# Altium footprint library Silabs.PcbLib: 18 footprints (part 1 of 2)
Each footprint in its own frame and in the unit in brackets; x right, y up, seen from the top. Pads: shape width x height; smd on the part's side, far side on the other; paste and mask are expansions set on the pad; w line width, h text height; cw(c..) or ccw(c..) is an arc to the next point about the centre after c.
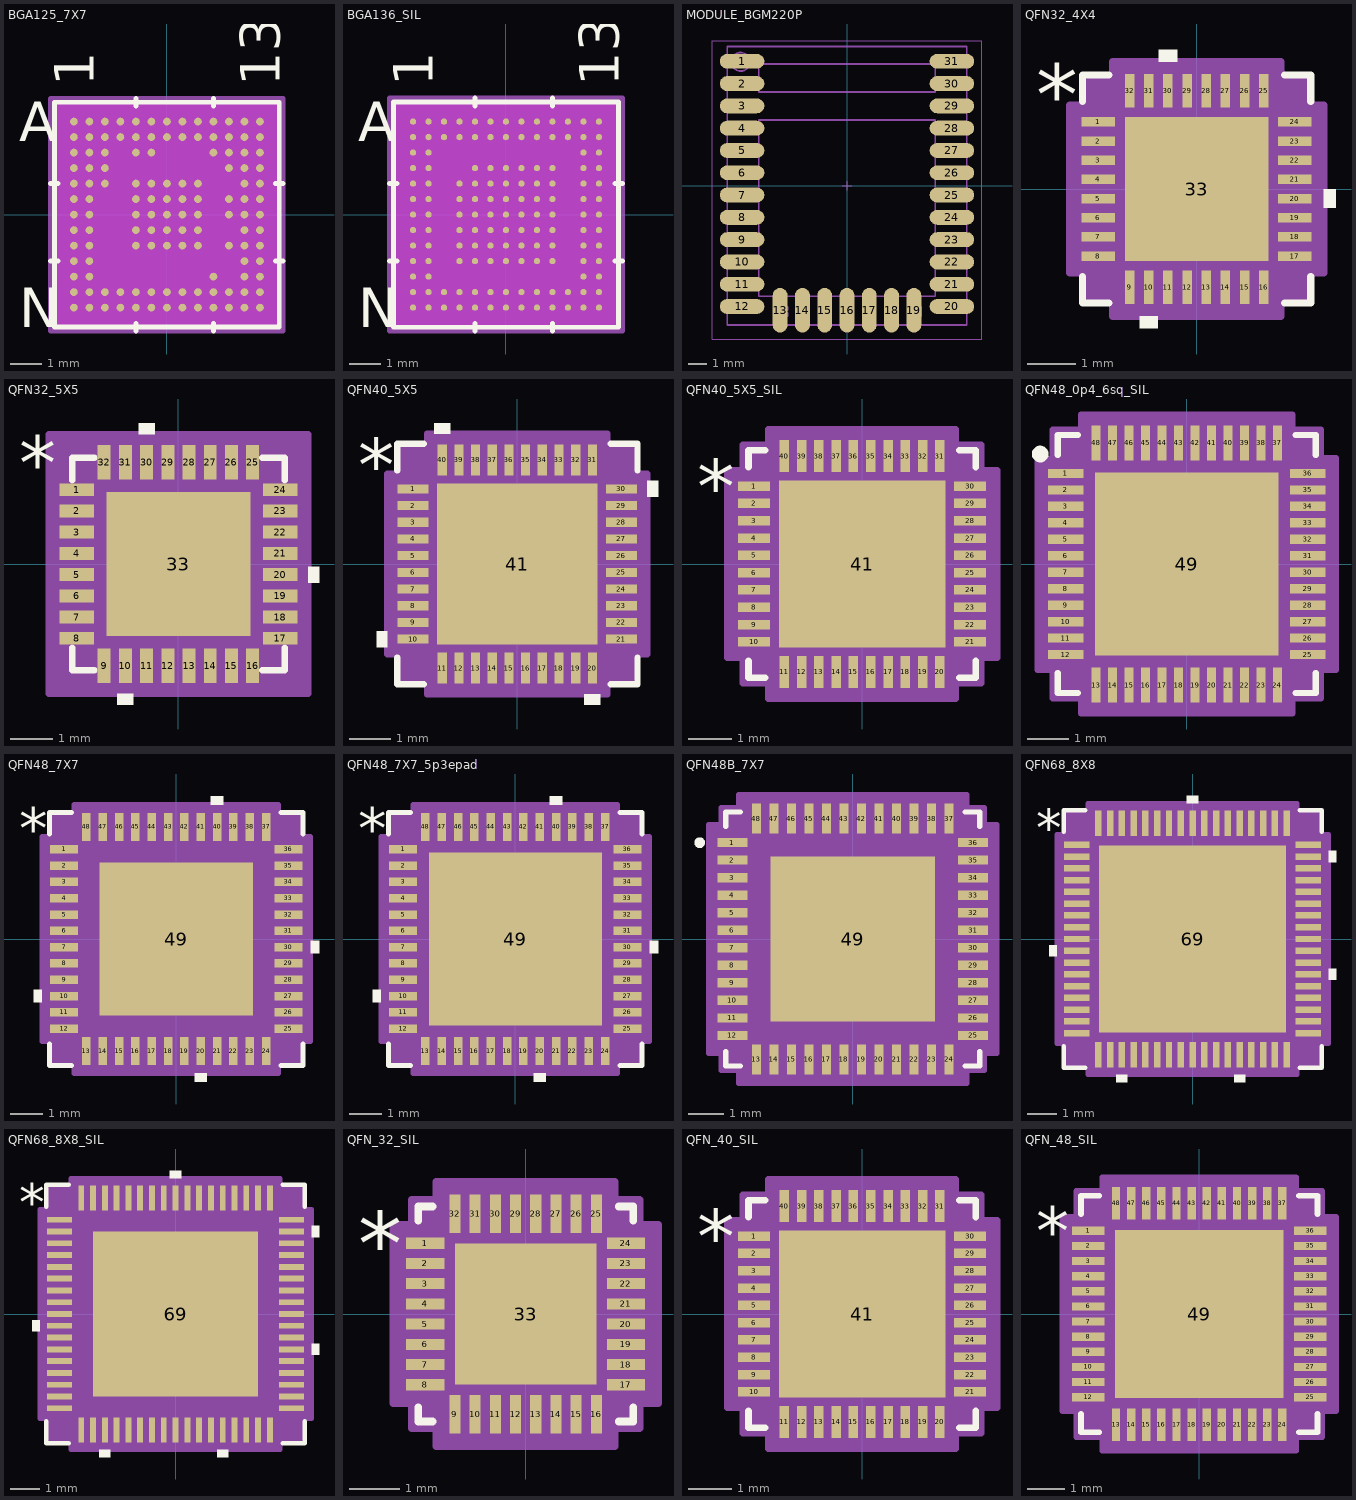
[diagram p0: the footprints below, top view; thin cyan lines are the x and y axes]

## BGA125_7X7 [mm]
pads (125):
  round 0.25 smd paste+0 mask+0.064: A1(-3,3) A2(-2.5,3) A3(-2,3) A4(-1.5,3) A5(-1,3) A6(-0.5,3) A7(0,3) A8(0.5,3) A9(1,3) A10(1.5,3) A11(2,3) A12(2.5,3) A13(3,3) B1(-3,2.5) B2(-2.5,2.5) B3(-2,2.5) B4(-1.5,2.5) B5(-1,2.5) B6(-0.5,2.5) B7(0,2.5) B8(0.5,2.5) B9(1,2.5) B10(1.5,2.5) B11(2,2.5) B12(2.5,2.5) B13(3,2.5) C1(-3,2) C2(-2.5,2) C3(-2,2) C5(-1,2) C6(-0.5,2) C10(1.5,2) C11(2,2) C12(2.5,2) C13(3,2) D1(-3,1.5) D2(-2.5,1.5) D3(-2,1.5) D11(2,1.5) D12(2.5,1.5) D13(3,1.5) E1(-3,1) E2(-2.5,1) E3(-2,1) E5(-1,1) E6(-0.5,1) E7(0,1) E8(0.5,1) E9(1,1) E12(2.5,1) E13(3,1) F1(-3,0.5) F2(-2.5,0.5) F5(-1,0.5) F6(-0.5,0.5) F7(0,0.5) F8(0.5,0.5) F9(1,0.5) F11(2,0.5) F12(2.5,0.5) F13(3,0.5) G1(-3,0) G2(-2.5,0) G5(-1,0) G6(-0.5,0) G7(0,0) G8(0.5,0) G9(1,0) G11(2,0) G12(2.5,0) G13(3,0) H1(-3,-0.5) H2(-2.5,-0.5) H5(-1,-0.5) H6(-0.5,-0.5) H7(0,-0.5) H8(0.5,-0.5) H9(1,-0.5) H12(2.5,-0.5) H13(3,-0.5) J1(-3,-1) J2(-2.5,-1) J5(-1,-1) J6(-0.5,-1) J7(0,-1) J8(0.5,-1) J9(1,-1) J11(2,-1) J12(2.5,-1) J13(3,-1) K1(-3,-1.5) K2(-2.5,-1.5) K12(2.5,-1.5) K13(3,-1.5) L1(-3,-2) L2(-2.5,-2) L10(1.5,-2) L12(2.5,-2) L13(3,-2) M1(-3,-2.5) M2(-2.5,-2.5) M3(-2,-2.5) M4(-1.5,-2.5) M5(-1,-2.5) M6(-0.5,-2.5) M7(0,-2.5) M8(0.5,-2.5) M9(1,-2.5) M10(1.5,-2.5) M11(2,-2.5) M12(2.5,-2.5) M13(3,-2.5) N1(-3,-3) N2(-2.5,-3) N3(-2,-3) N4(-1.5,-3) N5(-1,-3) N6(-0.5,-3) N7(0,-3) N8(0.5,-3) N9(1,-3) N10(1.5,-3) N11(2,-3) N12(2.5,-3) N13(3,-3)
Top Overlay:
  lines w0.152: -3.754,-1.5 -3.5,-1.5 ; -3.754,1 -3.5,1 ; -1,-3.754 -1,-3.5 ; -1,3.5 -1,3.754 ; 1.5,-3.754 1.5,-3.5 ; 1.5,3.5 1.5,3.754 ; 3.5,-1.5 3.754,-1.5 ; 3.5,1 3.754,1 ; -3.627,-3.627 3.627,-3.627 3.627,3.627 -3.627,3.627 -3.627,-3.627
  text "A" at -4.77,2.365 h1.27
  text "N" at -4.77,-3.635 h1.27
  text "1" at -2.365,4.135 h1.27
  text "13" at 3.635,4.135 h1.27
Bottom Overlay:
  text "A" at -4.135,2.365 h1.27
  text "N" at -4.135,-3.635 h1.27
  text "1" at -3.635,4.135 h1.27
  text "13" at 2.365,4.135 h1.27
Keep-Out Layer:
  region: -3.695,-3.695 -3.695,3.695 3.695,3.695 3.695,-3.695
Mechanical 13:
  lines w0.025: -3.5,3.25 -3.25,3.5 ; -3.5,-3.5 3.5,-3.5 3.5,3.5 -3.5,3.5 -3.5,-3.5
  text "A" at -4.77,2.365 h1.27
  text "N" at -4.77,-3.635 h1.27
  text "1" at -2.365,4.135 h1.27
  text "13" at 3.635,4.135 h1.27
Mechanical 15:
  region: 3.754,-3.754 -3.754,-3.754 -3.754,3.754 3.754,3.754
  lines w0.152: -3.754,-3.754 -3.754,3.754 3.754,3.754 3.754,-3.754 -3.754,-3.754
3D body "BGA125_7X7.step": height 1.27, standoff 0, extent -3.5,-3.5 3.5,3.5

## BGA136_SIL [mil]
pads (136):
  round 8 smd paste+0 mask+0: A1(-118.11,118.11) A2(-98.43,118.11) A3(-78.74,118.11) A4(-59.06,118.11) A5(-39.37,118.11) A6(-19.68,118.11) A7(0,118.11) A8(19.68,118.11) A9(39.37,118.11) A10(59.06,118.11) A11(78.74,118.11) A12(98.43,118.11) A13(118.11,118.11) B1(-118.11,98.43) B2(-98.43,98.43) B3(-78.74,98.43) B4(-59.06,98.43) B5(-39.37,98.43) B6(-19.68,98.43) B7(0,98.43) B8(19.68,98.43) B9(39.37,98.43) B10(59.06,98.43) B11(78.74,98.43) B12(98.43,98.43) B13(118.11,98.43) C1(-118.11,78.74) C2(-98.43,78.74) C12(98.43,78.74) C13(118.11,78.74) D1(-118.11,59.06) D2(-98.43,59.06) D5(-39.37,59.06) D6(-19.68,59.06) D7(0,59.06) D8(19.68,59.06) D9(39.37,59.06) D10(59.06,59.06) D12(98.43,59.06) D13(118.11,59.06) E1(-118.11,39.37) E2(-98.43,39.37) E4(-59.06,39.37) E5(-39.37,39.37) E6(-19.68,39.37) E7(0,39.37) E8(19.68,39.37) E9(39.37,39.37) E10(59.06,39.37) E12(98.43,39.37) E13(118.11,39.37) F1(-118.11,19.68) F2(-98.43,19.68) F4(-59.06,19.68) F5(-39.37,19.68) F6(-19.68,19.68) F7(0,19.68) F8(19.68,19.68) F9(39.37,19.68) F10(59.06,19.68) F12(98.43,19.68) F13(118.11,19.68) G1(-118.11,0) G2(-98.43,0) G4(-59.06,0) G5(-39.37,0) G6(-19.68,0) G7(0,0) G8(19.68,0) G9(39.37,0) G10(59.06,0) G12(98.43,0) G13(118.11,0) H1(-118.11,-19.68) H2(-98.43,-19.68) H4(-59.06,-19.68) H5(-39.37,-19.68) H6(-19.68,-19.68) H7(0,-19.68) H8(19.68,-19.68) H9(39.37,-19.68) H10(59.06,-19.68) H12(98.43,-19.68) H13(118.11,-19.68) J1(-118.11,-39.37) J2(-98.43,-39.37) J4(-59.06,-39.37) J5(-39.37,-39.37) J6(-19.68,-39.37) J7(0,-39.37) J8(19.68,-39.37) J9(39.37,-39.37) J10(59.06,-39.37) J12(98.43,-39.37) J13(118.11,-39.37) K1(-118.11,-59.06) K2(-98.43,-59.06) K4(-59.06,-59.06) K5(-39.37,-59.06) K6(-19.68,-59.06) K7(0,-59.06) K8(19.68,-59.06) K9(39.37,-59.06) K10(59.06,-59.06) K12(98.43,-59.06) K13(118.11,-59.06) L1(-118.11,-78.74) L2(-98.43,-78.74) L12(98.43,-78.74) L13(118.11,-78.74) M1(-118.11,-98.43) M2(-98.43,-98.43) M3(-78.74,-98.43) M4(-59.06,-98.43) M5(-39.37,-98.43) M6(-19.68,-98.43) M7(0,-98.43) M8(19.68,-98.43) M9(39.37,-98.43) M10(59.06,-98.43) M11(78.74,-98.43) M12(98.43,-98.43) M13(118.11,-98.43) N1(-118.11,-118.11) N2(-98.43,-118.11) N3(-78.74,-118.11) N4(-59.06,-118.11) N5(-39.37,-118.11) N6(-19.68,-118.11) N7(0,-118.11) N8(19.68,-118.11) N9(39.37,-118.11) N10(59.06,-118.11) N11(78.74,-118.11) N12(98.43,-118.11) N13(118.11,-118.11)
Top Overlay:
  lines w6: -148,-59.06 -138,-59.06 ; -148,39.37 -138,39.37 ; -39.37,-148 -39.37,-138 ; -39.37,138 -39.37,148 ; 59.06,-148 59.06,-138 ; 59.06,138 59.06,148 ; 138,-59.06 148,-59.06 ; 138,39.37 148,39.37 ; -143,-143 143,-143 143,143 -143,143 -143,-143
  text "A" at -188,93.11 h50
  text "N" at -188,-143.11 h50
  text "1" at -93.11,163 h50
  text "13" at 143.11,163 h50
Bottom Overlay:
  text "A" at -163,93.11 h50
  text "N" at -163,-143.11 h50
  text "1" at -143.11,163 h50
  text "13" at 93.11,163 h50
Keep-Out Layer:
  region: -145.45,-145.45 -145.45,145.45 145.45,145.45 145.45,-145.45
Mechanical 13:
  lines w1: -138,128.16 -128.16,138 ; -138,-138 138,-138 138,138 -138,138 -138,-138
  text "A" at -188,93.11 h50
  text "N" at -188,-143.11 h50
  text "1" at -93.11,163 h50
  text "13" at 143.11,163 h50
Mechanical 15:
  region: 148,-148 -148,-148 -148,148 148,148
  lines w6: -148,-148 -148,148 148,148 148,-148 -148,-148
3D body "BGA136_SIL.step": height 32.09, standoff 0.02, extent -137.99,-137.99 137.99,137.99

## MODULE_BGM220P [mm] "copied from Tamas (200623)"
height 1
pads (31):
  oval 2.4x0.8 smd mask+0.051: 1(-5.65,6.7) 2(-5.65,5.5) 3(-5.65,4.3) 4(-5.65,3.1) 5(-5.65,1.9) 6(-5.65,0.7) 7(-5.65,-0.5) 8(-5.65,-1.7) 9(-5.65,-2.9) 10(-5.65,-4.1) 11(-5.65,-5.3) 12(-5.65,-6.5) 21(5.65,-5.3) 22(5.65,-4.1) 23(5.65,-2.9) 24(5.65,-1.7) 25(5.65,-0.5) 26(5.65,0.7) 27(5.65,1.9) 28(5.65,3.1) 29(5.65,4.3) 30(5.65,5.5) 31(5.65,6.7)
  oval 0.8x2.4 smd mask+0.051: 13(-3.6,-6.7) 14(-2.4,-6.7) 15(-1.2,-6.7) 16(0,-6.7) 17(1.2,-6.7) 18(2.4,-6.7) 19(3.6,-6.7)
  oval 2.4x0.8 smd paste+0 mask+0.051: 20(5.65,-6.5)
Mechanical 15:
  lines w0.05: 0,-0.25 0,0.25 0,0 ; 0,0 0.25,0 -0.25,0 0,0 ; -7.25,-8.25 -7.25,7.8 7.25,7.8 7.25,-8.25 -7.25,-8.25
Multi-Layer:
  pour cut-out: -3.75,7.5 -3.75,2.6 3.75,2.6 3.75,7.5
Mechanical 19:
  circle w0.1: c-5.724,6.671 r0.5
  lines w0.1: -6.044,-6.784 -5.846,-6.784 ; -6.044,-6.387 -5.945,-6.149 -5.945,-6.784 ; -5.805,6.391 -5.607,6.391 ; -5.805,6.788 -5.706,7.026 -5.706,6.391 ; -5.648,-6.227 -5.566,-6.149 -5.409,-6.149 -5.33,-6.227 -5.33,-6.387 -5.648,-6.705 -5.648,-6.784 -5.33,-6.784 ; -3.918,-7.083 -3.72,-7.083 ; -3.918,-6.687 -3.819,-6.448 -3.819,-7.083 ; -3.522,-7.005 -3.443,-7.083 -3.283,-7.083 -3.204,-7.005 -3.204,-6.845 -3.283,-6.766 -3.204,-6.687 -3.204,-6.527 -3.283,-6.448 -3.443,-6.448 -3.522,-6.527 ; 3.28,-7.083 3.478,-7.083 ; 3.28,-6.687 3.379,-6.448 3.379,-7.083 ; 3.679,-7.005 3.758,-7.083 3.915,-7.083 3.997,-7.005 3.997,-6.527 3.915,-6.448 3.758,-6.448 3.679,-6.527 3.679,-6.705 3.758,-6.786 3.915,-6.786 3.997,-6.705 ; 5.277,-6.227 5.356,-6.149 5.516,-6.149 5.594,-6.227 5.594,-6.387 5.277,-6.705 5.277,-6.784 5.594,-6.784 ; 5.277,6.47 5.356,6.391 5.516,6.391 5.594,6.47 5.594,6.63 5.516,6.709 5.594,6.788 5.594,6.948 5.516,7.026 5.356,7.026 5.277,6.948 ; 5.833,6.391 6.031,6.391 ; 5.833,6.788 5.932,7.026 5.932,6.391 ; -6.45,-7.5 -6.45,7.5 6.45,7.5 6.45,-7.5 -4.051,-7.5 -6.45,-7.5 ; -4.751,-5.951 -4.751,3.549 4.751,3.549 4.751,-5.951 -4.751,-5.951 ; -4.751,5.05 -4.751,6.551 4.751,6.551 4.751,5.05 -4.751,5.05 ; 5.792,-6.705 5.792,-6.227 5.871,-6.149 5.952,-6.149 6.031,-6.227 6.031,-6.705 5.952,-6.784 5.871,-6.784 5.792,-6.705
  text ".Designator" at -0.625,-0.5 h1
3D body: height 2.5, standoff 0.8, extent -5.95,-7 5.95,3.549
3D body: height 2, standoff 0.8, extent -2.1,5.5 0.9,7
3D body: height 1.05, standoff 0.8, extent 2.15,6.65 2.75,6.95
3D body: height 1.05, standoff 0.8, extent -1.55,3.6 -1.25,4.2
3D body: height 0.81, standoff 0.8, extent -6.224,6.172 -5.225,7.171
3D body: height 0.8, standoff 0, extent -6.45,-7.5 6.45,7.5

## QFN32_4X4 [mm]
pads (33):
  rect 0.7x0.2 smd paste-0.1 mask+0: 1(-2.05,1.4) 2(-2.05,1) 3(-2.05,0.6) 4(-2.05,0.2) 5(-2.05,-0.2) 6(-2.05,-0.6) 7(-2.05,-1) 8(-2.05,-1.4) 17(2.05,-1.4) 18(2.05,-1) 19(2.05,-0.6) 20(2.05,-0.2) 21(2.05,0.2) 22(2.05,0.6) 23(2.05,1) 24(2.05,1.4)
  rect 0.2x0.7 smd paste-0.1 mask+0: 9(-1.4,-2.05) 10(-1,-2.05) 11(-0.6,-2.05) 12(-0.2,-2.05) 13(0.2,-2.05) 14(0.6,-2.05) 15(1,-2.05) 16(1.4,-2.05) 25(1.4,2.05) 26(1,2.05) 27(0.6,2.05) 28(0.2,2.05) 29(-0.2,2.05) 30(-0.6,2.05) 31(-1,2.05) 32(-1.4,2.05)
  rect 3x3 smd paste-1.5 mask+0: 33(0,0)
Top Overlay:
  region: -0.409,2.654 -0.79,2.654 -0.79,2.908 -0.409,2.908
  region: 2.654,-0.009 2.908,-0.009 2.908,-0.39 2.654,-0.39
  region: -0.81,-2.654 -1.191,-2.654 -1.191,-2.908 -0.81,-2.908
  lines w0.152: -2.381,-1.833 -2.381,-2.381 -1.833,-2.381 ; -2.381,1.833 -2.381,2.381 -1.833,2.381 ; 1.833,-2.381 2.381,-2.381 2.381,-1.833 ; 1.833,2.381 2.381,2.381 2.381,1.833
  text "*" at -3.353,1.346 h1.27
Top Paste:
  region: 1.4,-0.1 0.1,-0.1 0.1,-1.4 1.4,-1.4
  region: 1.4,1.4 0.1,1.4 0.1,0.1 1.4,0.1
  region: -0.1,-0.1 -1.4,-0.1 -1.4,-1.4 -0.1,-1.4
  region: -0.1,1.4 -1.4,1.4 -1.4,0.1 -0.1,0.1
  region: -1.3,2.4 -1.5,2.4 -1.5,1.7 -1.3,1.7
  region: -0.9,2.4 -1.1,2.4 -1.1,1.7 -0.9,1.7
  region: -0.5,2.4 -0.7,2.4 -0.7,1.7 -0.5,1.7
  region: -0.1,2.4 -0.3,2.4 -0.3,1.7 -0.1,1.7
  region: 0.3,2.4 0.1,2.4 0.1,1.7 0.3,1.7
  region: 0.7,2.4 0.5,2.4 0.5,1.7 0.7,1.7
  region: 1.1,2.4 0.9,2.4 0.9,1.7 1.1,1.7
  region: 1.5,2.4 1.3,2.4 1.3,1.7 1.5,1.7
  region: 2.4,1.5 1.7,1.5 1.7,1.3 2.4,1.3
  region: 2.4,1.1 1.7,1.1 1.7,0.9 2.4,0.9
  region: 2.4,0.7 1.7,0.7 1.7,0.5 2.4,0.5
  region: 2.4,0.3 1.7,0.3 1.7,0.1 2.4,0.1
  region: 2.4,-0.1 1.7,-0.1 1.7,-0.3 2.4,-0.3
  region: 2.4,-0.5 1.7,-0.5 1.7,-0.7 2.4,-0.7
  region: 2.4,-0.9 1.7,-0.9 1.7,-1.1 2.4,-1.1
  region: 2.4,-1.3 1.7,-1.3 1.7,-1.5 2.4,-1.5
  region: 1.5,-1.7 1.3,-1.7 1.3,-2.4 1.5,-2.4
  region: 1.1,-1.7 0.9,-1.7 0.9,-2.4 1.1,-2.4
  region: 0.7,-1.7 0.5,-1.7 0.5,-2.4 0.7,-2.4
  region: 0.3,-1.7 0.1,-1.7 0.1,-2.4 0.3,-2.4
  region: -0.1,-1.7 -0.3,-1.7 -0.3,-2.4 -0.1,-2.4
  region: -0.5,-1.7 -0.7,-1.7 -0.7,-2.4 -0.5,-2.4
  region: -0.9,-1.7 -1.1,-1.7 -1.1,-2.4 -0.9,-2.4
  region: -1.3,-1.7 -1.5,-1.7 -1.5,-2.4 -1.3,-2.4
  region: -1.7,-1.3 -2.4,-1.3 -2.4,-1.5 -1.7,-1.5
  region: -1.7,-0.9 -2.4,-0.9 -2.4,-1.1 -1.7,-1.1
  region: -1.7,-0.5 -2.4,-0.5 -2.4,-0.7 -1.7,-0.7
  region: -1.7,-0.1 -2.4,-0.1 -2.4,-0.3 -1.7,-0.3
  region: -1.7,0.3 -2.4,0.3 -2.4,0.1 -1.7,0.1
  region: -1.7,0.7 -2.4,0.7 -2.4,0.5 -1.7,0.5
  region: -1.7,1.1 -2.4,1.1 -2.4,0.9 -1.7,0.9
  region: -1.7,1.5 -2.4,1.5 -2.4,1.3 -1.7,1.3
Top Solder:
  region: -1.3,2.4 -1.5,2.4 -1.5,1.7 -1.3,1.7
  region: -0.9,2.4 -1.1,2.4 -1.1,1.7 -0.9,1.7
  region: -0.5,2.4 -0.7,2.4 -0.7,1.7 -0.5,1.7
  region: -0.1,2.4 -0.3,2.4 -0.3,1.7 -0.1,1.7
  region: 0.3,2.4 0.1,2.4 0.1,1.7 0.3,1.7
  region: 0.7,2.4 0.5,2.4 0.5,1.7 0.7,1.7
  region: 1.1,2.4 0.9,2.4 0.9,1.7 1.1,1.7
  region: 1.5,2.4 1.3,2.4 1.3,1.7 1.5,1.7
  region: 2.4,1.5 1.7,1.5 1.7,1.3 2.4,1.3
  region: 2.4,1.1 1.7,1.1 1.7,0.9 2.4,0.9
  region: 2.4,0.7 1.7,0.7 1.7,0.5 2.4,0.5
  region: 2.4,0.3 1.7,0.3 1.7,0.1 2.4,0.1
  region: 2.4,-0.1 1.7,-0.1 1.7,-0.3 2.4,-0.3
  region: 2.4,-0.5 1.7,-0.5 1.7,-0.7 2.4,-0.7
  region: 2.4,-0.9 1.7,-0.9 1.7,-1.1 2.4,-1.1
  region: 2.4,-1.3 1.7,-1.3 1.7,-1.5 2.4,-1.5
  region: 1.5,-1.7 1.3,-1.7 1.3,-2.4 1.5,-2.4
  region: 1.1,-1.7 0.9,-1.7 0.9,-2.4 1.1,-2.4
  region: 0.7,-1.7 0.5,-1.7 0.5,-2.4 0.7,-2.4
  region: 0.3,-1.7 0.1,-1.7 0.1,-2.4 0.3,-2.4
  region: -0.1,-1.7 -0.3,-1.7 -0.3,-2.4 -0.1,-2.4
  region: -0.5,-1.7 -0.7,-1.7 -0.7,-2.4 -0.5,-2.4
  region: -0.9,-1.7 -1.1,-1.7 -1.1,-2.4 -0.9,-2.4
  region: -1.3,-1.7 -1.5,-1.7 -1.5,-2.4 -1.3,-2.4
  region: -1.7,-1.3 -2.4,-1.3 -2.4,-1.5 -1.7,-1.5
  region: -1.7,-0.9 -2.4,-0.9 -2.4,-1.1 -1.7,-1.1
  region: -1.7,-0.5 -2.4,-0.5 -2.4,-0.7 -1.7,-0.7
  region: -1.7,-0.1 -2.4,-0.1 -2.4,-0.3 -1.7,-0.3
  region: -1.7,0.3 -2.4,0.3 -2.4,0.1 -1.7,0.1
  region: -1.7,0.7 -2.4,0.7 -2.4,0.5 -1.7,0.5
  region: -1.7,1.1 -2.4,1.1 -2.4,0.9 -1.7,0.9
  region: -1.7,1.5 -2.4,1.5 -2.4,1.3 -1.7,1.3
Mechanical 13:
  lines w0.025: -2,0.73 -0.73,2 ; -2,-2 -2,2 2,2 2,-2 -2,-2
  text "*" at -1.763,0.965 h1.27
Mechanical 15:
  region: -1.754,-2.254 -2.254,-2.254 -2.254,-1.754 -2.654,-1.754 -2.654,1.754 -2.254,1.754 -2.254,2.254 -1.754,2.254 -1.754,2.654 1.754,2.654 1.754,2.254 2.254,2.254 2.254,1.754 2.654,1.754 2.654,-1.754 2.254,-1.754 2.254,-2.254 1.754,-2.254 1.754,-2.654 -1.754,-2.654
  lines w0.152: -2.654,-1.754 -2.654,1.754 -2.254,1.754 -2.254,2.254 -1.754,2.254 -1.754,2.654 1.754,2.654 1.754,2.254 2.254,2.254 2.254,1.754 2.654,1.754 2.654,-1.754 2.254,-1.754 2.254,-2.254 1.754,-2.254 1.754,-2.654 -1.754,-2.654 -1.754,-2.254 -2.254,-2.254 -2.254,-1.754 -2.654,-1.754
3D body "QFN32_4X4.step": height 0.55, standoff 0, extent -2.051,-2.051 2.051,2.051

## QFN32_5X5 [mil]
pads (33):
  rect 32x12 smd paste-16 mask-16: 1(-94.5,68.9) 2(-94.5,49.21) 3(-94.5,29.53) 4(-94.5,9.84) 5(-94.5,-9.84) 6(-94.5,-29.53) 7(-94.5,-49.21) 8(-94.5,-68.9) 17(94.5,-68.9) 18(94.5,-49.21) 19(94.5,-29.53) 20(94.5,-9.84) 21(94.5,9.84) 22(94.5,29.53) 23(94.5,49.21) 24(94.5,68.9)
  rect 12x32 smd paste-16 mask-16: 9(-68.9,-94.5) 10(-49.21,-94.5) 11(-29.53,-94.5) 12(-9.84,-94.5) 13(9.84,-94.5) 14(29.53,-94.5) 15(49.21,-94.5) 16(68.9,-94.5) 25(68.9,94.5) 26(49.21,94.5) 27(29.53,94.5) 28(9.84,94.5) 29(-9.84,94.5) 30(-29.53,94.5) 31(-49.21,94.5) 32(-68.9,94.5)
  rect 134x134 smd paste-66.5 mask+0: 33(0,0)
Top Overlay:
  region: -41.71,-120.5 -56.71,-120.5 -56.71,-130.5 -41.71,-130.5
  region: 120.5,-2.34 130.5,-2.34 130.5,-17.34 120.5,-17.34
  region: -22.03,120.5 -37.03,120.5 -37.03,130.5 -22.03,130.5
  lines w6: -98.5,-77.9 -98.5,-98.5 -77.9,-98.5 ; -98.5,77.9 -98.5,98.5 -77.9,98.5 ; 77.9,-98.5 98.5,-98.5 98.5,-77.9 ; 77.9,98.5 98.5,98.5 98.5,77.9
  text "*" at -148,68.74 h50
Top Paste:
  region: -3.94,63.06 -63.06,63.06 -63.06,3.94 -3.94,3.94
  region: -3.94,-3.94 -63.06,-3.94 -63.06,-63.06 -3.94,-63.06
  region: 63.06,63.06 3.94,63.06 3.94,3.94 63.06,3.94
  region: 63.06,-3.94 3.94,-3.94 3.94,-63.06 63.06,-63.06
Mechanical 13:
  lines w1: -98.5,48.5 -48.5,98.5 ; -98.5,-98.5 98.5,-98.5 98.5,98.5 -98.5,98.5 -98.5,-98.5 ; -98.5,-74.9 -98.5,-62.9 -98.5,-74.9 ; -98.5,-55.21 -98.5,-43.21 -98.5,-55.21 ; -98.5,-35.53 -98.5,-23.53 -98.5,-35.53 ; -98.5,-15.84 -98.5,-3.84 -98.5,-15.84 ; -98.5,3.84 -98.5,15.84 -98.5,3.84 ; -98.5,23.53 -98.5,35.53 -98.5,23.53 ; -98.5,43.21 -98.5,55.21 -98.5,43.21 ; -98.5,62.9 -98.5,74.9 -98.5,62.9 ; -74.9,-98.5 -62.9,-98.5 -74.9,-98.5 ; -74.9,98.5 -62.9,98.5 -74.9,98.5 ; -55.21,-98.5 -43.21,-98.5 -55.21,-98.5 ; -55.21,98.5 -43.21,98.5 -55.21,98.5 ; -35.53,-98.5 -23.53,-98.5 -35.53,-98.5 ; -35.53,98.5 -23.53,98.5 -35.53,98.5 ; -15.84,-98.5 -3.84,-98.5 -15.84,-98.5 ; -15.84,98.5 -3.84,98.5 -15.84,98.5 ; 3.84,-98.5 15.84,-98.5 3.84,-98.5 ; 3.84,98.5 15.84,98.5 3.84,98.5 ; 23.53,-98.5 35.53,-98.5 23.53,-98.5 ; 23.53,98.5 35.53,98.5 23.53,98.5 ; 43.21,-98.5 55.21,-98.5 43.21,-98.5 ; 43.21,98.5 55.21,98.5 43.21,98.5 ; 62.9,-98.5 74.9,-98.5 62.9,-98.5 ; 62.9,98.5 74.9,98.5 62.9,98.5 ; 98.5,-74.9 98.5,-62.9 98.5,-74.9 ; 98.5,-55.21 98.5,-43.21 98.5,-55.21 ; 98.5,-35.53 98.5,-23.53 98.5,-35.53 ; 98.5,-15.84 98.5,-3.84 98.5,-15.84 ; 98.5,3.84 98.5,15.84 98.5,3.84 ; 98.5,23.53 98.5,35.53 98.5,23.53 ; 98.5,43.21 98.5,55.21 98.5,43.21 ; 98.5,62.9 98.5,74.9 98.5,62.9
  text "*" at -148,68.74 h50
Mechanical 15:
  region: 120.5,-120.5 -120.5,-120.5 -120.5,120.5 120.5,120.5
  lines w6: -120.5,-120.5 -120.5,120.5 120.5,120.5 120.5,-120.5 -120.5,-120.5
3D body "QFN32_5X5.step": height 39.09, standoff 0, extent -98.5,-98.5 98.5,98.5

## QFN40_5X5 [mm]
pads (41):
  rect 0.74x0.22 smd paste-0.11 mask+0: 1(-2.495,1.8) 2(-2.495,1.4) 3(-2.495,1) 4(-2.495,0.6) 5(-2.495,0.2) 6(-2.495,-0.2) 7(-2.495,-0.6) 8(-2.495,-1) 9(-2.495,-1.4) 10(-2.495,-1.8) 21(2.495,-1.8) 22(2.495,-1.4) 23(2.495,-1) 24(2.495,-0.6) 25(2.495,-0.2) 26(2.495,0.2) 27(2.495,0.6) 28(2.495,1) 29(2.495,1.4) 30(2.495,1.8)
  rect 0.22x0.74 smd paste-0.11 mask+0: 11(-1.8,-2.495) 12(-1.4,-2.495) 13(-1,-2.495) 14(-0.6,-2.495) 15(-0.2,-2.495) 16(0.2,-2.495) 17(0.6,-2.495) 18(1,-2.495) 19(1.4,-2.495) 20(1.8,-2.495) 31(1.8,2.495) 32(1.4,2.495) 33(1,2.495) 34(0.6,2.495) 35(0.2,2.495) 36(-0.2,2.495) 37(-0.6,2.495) 38(-1,2.495) 39(-1.4,2.495) 40(-1.8,2.495)
  rect 3.85x3.85 smd paste-1.912 mask+0: 41(0,0)
Top Overlay:
  region: -3.119,-1.609 -3.373,-1.609 -3.373,-1.99 -3.119,-1.99
  region: 1.99,-3.119 1.609,-3.119 1.609,-3.373 1.99,-3.373
  region: 3.119,1.99 3.373,1.99 3.373,1.609 3.119,1.609
  region: -1.609,3.119 -1.99,3.119 -1.99,3.373 -1.609,3.373
  lines w0.152: -2.881,-2.242 -2.881,-2.881 -2.242,-2.881 ; -2.881,2.242 -2.881,2.881 -2.242,2.881 ; 2.242,-2.881 2.881,-2.881 2.881,-2.242 ; 2.242,2.881 2.881,2.881 2.881,2.242
  text "*" at -3.818,1.746 h1.27
Top Paste:
  region: -0.742,1.825 -1.825,1.825 -1.825,0.742 -0.742,0.742
  region: -0.742,0.542 -1.825,0.542 -1.825,-0.542 -0.742,-0.542
  region: -0.742,-0.742 -1.825,-0.742 -1.825,-1.825 -0.742,-1.825
  region: 0.542,1.825 -0.542,1.825 -0.542,0.742 0.542,0.742
  region: 0.542,0.542 -0.542,0.542 -0.542,-0.542 0.542,-0.542
  region: 0.542,-0.742 -0.542,-0.742 -0.542,-1.825 0.542,-1.825
  region: 1.825,1.825 0.742,1.825 0.742,0.742 1.825,0.742
  region: 1.825,0.542 0.742,0.542 0.742,-0.542 1.825,-0.542
  region: 1.825,-0.742 0.742,-0.742 0.742,-1.825 1.825,-1.825
Mechanical 13:
  lines w0.025: -2.5,1.23 -1.23,2.5 ; -2.5,-2.5 2.5,-2.5 2.5,2.5 -2.5,2.5 -2.5,-2.5
  text "*" at -2.188,1.365 h1.27
Mechanical 15:
  region: -2.164,-2.754 -2.754,-2.754 -2.754,-2.164 -3.119,-2.164 -3.119,2.164 -2.754,2.164 -2.754,2.754 -2.164,2.754 -2.164,3.119 2.164,3.119 2.164,2.754 2.754,2.754 2.754,2.164 3.119,2.164 3.119,-2.164 2.754,-2.164 2.754,-2.754 2.164,-2.754 2.164,-3.119 -2.164,-3.119
  lines w0.152: -3.119,-2.164 -2.754,-2.164 -2.754,-2.754 -2.164,-2.754 -2.164,-3.119 2.164,-3.119 2.164,-2.754 2.754,-2.754 2.754,-2.164 3.119,-2.164 3.119,2.164 2.754,2.164 2.754,2.754 2.164,2.754 2.164,3.119 -2.164,3.119 -2.164,2.754 -2.754,2.754 -2.754,2.164 -3.119,2.164 -3.119,-2.164
3D body "QFN40_5X5.step": height 0.9, standoff 0, extent -2.551,-2.551 2.551,2.551

## QFN40_5X5_SIL [mm]
pads (41):
  rect 0.74x0.22 smd paste+0 mask+0: 1(-2.495,1.8) 2(-2.495,1.4) 3(-2.495,1) 4(-2.495,0.6) 5(-2.495,0.2) 6(-2.495,-0.2) 7(-2.495,-0.6) 8(-2.495,-1) 9(-2.495,-1.4) 10(-2.495,-1.8) 21(2.495,-1.8) 22(2.495,-1.4) 23(2.495,-1) 24(2.495,-0.6) 25(2.495,-0.2) 26(2.495,0.2) 27(2.495,0.6) 28(2.495,1) 29(2.495,1.4) 30(2.495,1.8)
  rect 0.22x0.74 smd paste+0 mask+0: 11(-1.8,-2.495) 12(-1.4,-2.495) 13(-1,-2.495) 14(-0.6,-2.495) 15(-0.2,-2.495) 16(0.2,-2.495) 17(0.6,-2.495) 18(1,-2.495) 19(1.4,-2.495) 20(1.8,-2.495) 31(1.8,2.495) 32(1.4,2.495) 33(1,2.495) 34(0.6,2.495) 35(0.2,2.495) 36(-0.2,2.495) 37(-0.6,2.495) 38(-1,2.495) 39(-1.4,2.495) 40(-1.8,2.495)
  rect 3.85x3.85 smd paste-1.912 mask+0: 41(0,0)
Top Overlay:
  lines w0.152: -2.627,-2.243 -2.627,-2.627 -2.243,-2.627 ; -2.627,2.243 -2.627,2.627 -2.243,2.627 ; 2.243,-2.627 2.627,-2.627 2.627,-2.243 ; 2.243,2.627 2.627,2.627 2.627,2.243
  text "*" at -3.818,1.165 h1.27
Top Paste:
  region: -0.742,1.825 -1.825,1.825 -1.825,0.742 -0.742,0.742
  region: -0.742,0.542 -1.825,0.542 -1.825,-0.542 -0.742,-0.542
  region: -0.742,-0.742 -1.825,-0.742 -1.825,-1.825 -0.742,-1.825
  region: 0.542,1.825 -0.542,1.825 -0.542,0.742 0.542,0.742
  region: 0.542,0.542 -0.542,0.542 -0.542,-0.542 0.542,-0.542
  region: 0.542,-0.742 -0.542,-0.742 -0.542,-1.825 0.542,-1.825
  region: 1.825,1.825 0.742,1.825 0.742,0.742 1.825,0.742
  region: 1.825,0.542 0.742,0.542 0.742,-0.542 1.825,-0.542
  region: 1.825,-0.742 0.742,-0.742 0.742,-1.825 1.825,-1.825
Mechanical 13:
  lines w0.025: -2.5,1.23 -1.23,2.5 ; -2.5,-2.5 2.5,-2.5 2.5,2.5 -2.5,2.5 -2.5,-2.5
  text "*" at -1.807,1.165 h1.27
Mechanical 15:
  region: -2.164,-2.754 -2.754,-2.754 -2.754,-2.164 -3.119,-2.164 -3.119,2.164 -2.754,2.164 -2.754,2.754 -2.164,2.754 -2.164,3.119 2.164,3.119 2.164,2.754 2.754,2.754 2.754,2.164 3.119,2.164 3.119,-2.164 2.754,-2.164 2.754,-2.754 2.164,-2.754 2.164,-3.119 -2.164,-3.119
  lines w0.152: -3.119,-2.164 -2.754,-2.164 -2.754,-2.754 -2.164,-2.754 -2.164,-3.119 2.164,-3.119 2.164,-2.754 2.754,-2.754 2.754,-2.164 3.119,-2.164 3.119,2.164 2.754,2.164 2.754,2.754 2.164,2.754 2.164,3.119 -2.164,3.119 -2.164,2.754 -2.754,2.754 -2.754,2.164 -3.119,2.164 -3.119,-2.164
3D body "QFN40_5X5_SIL.step": height 0.9, standoff 0, extent -2.5,-2.5 2.5,2.5

## QFN48_0p4_6sq_SIL [mm]
pads (49):
  rect 0.86x0.22 smd paste+0 mask+0: 1(-2.935,2.2) 2(-2.935,1.8) 3(-2.935,1.4) 4(-2.935,1) 5(-2.935,0.6) 6(-2.935,0.2) 7(-2.935,-0.2) 8(-2.935,-0.6) 9(-2.935,-1) 10(-2.935,-1.4) 11(-2.935,-1.8) 12(-2.935,-2.2) 25(2.935,-2.2) 26(2.935,-1.8) 27(2.935,-1.4) 28(2.935,-1) 29(2.935,-0.6) 30(2.935,-0.2) 31(2.935,0.2) 32(2.935,0.6) 33(2.935,1) 34(2.935,1.4) 35(2.935,1.8) 36(2.935,2.2)
  rect 0.22x0.86 smd paste+0 mask+0: 13(-2.2,-2.935) 14(-1.8,-2.935) 15(-1.4,-2.935) 16(-1,-2.935) 17(-0.6,-2.935) 18(-0.2,-2.935) 19(0.2,-2.935) 20(0.6,-2.935) 21(1,-2.935) 22(1.4,-2.935) 23(1.8,-2.935) 24(2.2,-2.935) 37(2.2,2.935) 38(1.8,2.935) 39(1.4,2.935) 40(1,2.935) 41(0.6,2.935) 42(0.2,2.935) 43(-0.2,2.935) 44(-0.6,2.935) 45(-1,2.935) 46(-1.4,2.935) 47(-1.8,2.935) 48(-2.2,2.935)
  rect 4.45x4.45 smd paste-2.212 mask+0: 49(0,0)
Top Overlay:
  circle w0.203: c-3.556,2.667 r0.102
  lines w0.152: -3.127,-2.643 -3.127,-3.127 -2.643,-3.127 ; -3.127,2.643 -3.127,3.127 -2.643,3.127 ; 2.643,-3.127 3.127,-3.127 3.127,-2.643 ; 2.643,3.127 3.127,3.127 3.127,2.643
Top Paste:
  region: 2.125,-0.842 0.842,-0.842 0.842,-2.125 2.125,-2.125
  region: 2.125,0.642 0.842,0.642 0.842,-0.642 2.125,-0.642
  region: 2.125,2.125 0.842,2.125 0.842,0.842 2.125,0.842
  region: 0.642,-0.842 -0.642,-0.842 -0.642,-2.125 0.642,-2.125
  region: 0.642,0.642 -0.642,0.642 -0.642,-0.642 0.642,-0.642
  region: 0.642,2.125 -0.642,2.125 -0.642,0.842 0.642,0.842
  region: -0.842,-0.842 -2.125,-0.842 -2.125,-2.125 -0.842,-2.125
  region: -0.842,0.642 -2.125,0.642 -2.125,-0.642 -0.842,-0.642
  region: -0.842,2.125 -2.125,2.125 -2.125,0.842 -0.842,0.842
Mechanical 13:
  lines w0.025: -3,1.73 -1.73,3 ; -3,-3 -3,3 3,3 3,-3 -3,-3
  text "*" at -2.188,1.565 h1.27
Mechanical 15:
  region: -2.564,-3.254 -3.254,-3.254 -3.254,-2.564 -3.619,-2.564 -3.619,2.564 -3.254,2.564 -3.254,3.254 -2.564,3.254 -2.564,3.619 2.564,3.619 2.564,3.254 3.254,3.254 3.254,2.564 3.619,2.564 3.619,-2.564 3.254,-2.564 3.254,-3.254 2.564,-3.254 2.564,-3.619 -2.564,-3.619
  lines w0.152: -3.619,-2.564 -3.619,2.54 -3.254,2.54 -3.254,3.254 -2.564,3.254 -2.564,3.619 2.564,3.619 2.564,3.254 3.254,3.254 3.254,2.564 3.619,2.564 3.619,-2.564 3.254,-2.564 3.254,-3.254 2.564,-3.254 2.564,-3.619 -2.564,-3.619 -2.564,-3.254 -3.254,-3.254 -3.254,-2.564 -3.619,-2.564
3D body "QFN48_0p4_6sq_SIL.step": height 0.9, standoff 0, extent -3,-3 3,3

## QFN48_7X7 [mm]
pads (49):
  rect 0.86x0.26 smd paste-0.13 mask+0: 1(-3.435,2.751) 2(-3.435,2.251) 3(-3.435,1.75) 4(-3.435,1.25) 5(-3.435,0.75) 6(-3.435,0.25) 7(-3.435,-0.25) 8(-3.435,-0.75) 9(-3.435,-1.25) 10(-3.435,-1.75) 11(-3.435,-2.251) 12(-3.435,-2.751) 25(3.435,-2.751) 26(3.435,-2.251) 27(3.435,-1.75) 28(3.435,-1.25) 29(3.435,-0.75) 30(3.435,-0.25) 31(3.435,0.25) 32(3.435,0.75) 33(3.435,1.25) 34(3.435,1.75) 35(3.435,2.251) 36(3.435,2.751)
  rect 0.26x0.86 smd paste-0.13 mask+0: 13(-2.751,-3.435) 14(-2.251,-3.435) 15(-1.75,-3.435) 16(-1.25,-3.435) 17(-0.75,-3.435) 18(-0.25,-3.435) 19(0.25,-3.435) 20(0.75,-3.435) 21(1.25,-3.435) 22(1.75,-3.435) 23(2.251,-3.435) 24(2.751,-3.435) 37(2.751,3.435) 38(2.251,3.435) 39(1.75,3.435) 40(1.25,3.435) 41(0.75,3.435) 42(0.25,3.435) 43(-0.25,3.435) 44(-0.75,3.435) 45(-1.25,3.435) 46(-1.75,3.435) 47(-2.251,3.435) 48(-2.751,3.435)
  rect 4.7x4.7 smd paste-2.35 mask+0: 49(0,0)
Top Overlay:
  region: -4.119,-1.56 -4.373,-1.56 -4.373,-1.941 -4.119,-1.941
  region: 0.941,-4.119 0.56,-4.119 0.56,-4.373 0.941,-4.373
  region: 4.119,-0.06 4.373,-0.06 4.373,-0.441 4.119,-0.441
  region: 1.441,4.119 1.06,4.119 1.06,4.373 1.441,4.373
  lines w0.152: -3.881,-3.213 -3.881,-3.881 -3.213,-3.881 ; -3.881,3.213 -3.881,3.881 -3.213,3.881 ; 3.213,-3.881 3.881,-3.881 3.881,-3.213 ; 3.213,3.881 3.881,3.881 3.881,3.213
  text "*" at -4.817,2.747 h1.27
Top Paste:
  region: -0.883,2.25 -2.25,2.25 -2.25,0.883 -0.883,0.883
  region: -0.883,0.683 -2.25,0.683 -2.25,-0.683 -0.883,-0.683
  region: -0.883,-0.883 -2.25,-0.883 -2.25,-2.25 -0.883,-2.25
  region: 0.683,2.25 -0.683,2.25 -0.683,0.883 0.683,0.883
  region: 0.683,0.683 -0.683,0.683 -0.683,-0.683 0.683,-0.683
  region: 0.683,-0.883 -0.683,-0.883 -0.683,-2.25 0.683,-2.25
  region: 2.25,2.25 0.883,2.25 0.883,0.883 2.25,0.883
  region: 2.25,0.683 0.883,0.683 0.883,-0.683 2.25,-0.683
  region: 2.25,-0.883 0.883,-0.883 0.883,-2.25 2.25,-2.25
Mechanical 13:
  lines w0.025: -3.5,2.23 -2.23,3.5 ; -3.5,-3.5 3.5,-3.5 3.5,3.5 -3.5,3.5 -3.5,-3.5
  text "*" at -3.069,2.366 h1.27
Mechanical 15:
  region: -3.135,-3.754 -3.754,-3.754 -3.754,-3.135 -4.119,-3.135 -4.119,3.135 -3.754,3.135 -3.754,3.754 -3.135,3.754 -3.135,4.119 3.135,4.119 3.135,3.754 3.754,3.754 3.754,3.135 4.119,3.135 4.119,-3.135 3.754,-3.135 3.754,-3.754 3.135,-3.754 3.135,-4.119 -3.135,-4.119
  lines w0.152: -4.119,-3.135 -3.754,-3.135 -3.754,-3.754 -3.135,-3.754 -3.135,-4.119 3.135,-4.119 3.135,-3.754 3.754,-3.754 3.754,-3.135 4.119,-3.135 4.119,3.135 3.754,3.135 3.754,3.754 3.135,3.754 3.135,4.119 -3.135,4.119 -3.135,3.754 -3.754,3.754 -3.754,3.135 -4.119,3.135 -4.119,-3.135
3D body "QFN48_7X7.step": height 0.9, standoff 0, extent -3.551,-3.551 3.551,3.551

## QFN48_7X7_5p3epad [mm]
pads (49):
  rect 0.86x0.26 smd paste-0.13 mask+0: 1(-3.435,2.751) 2(-3.435,2.251) 3(-3.435,1.75) 4(-3.435,1.25) 5(-3.435,0.75) 6(-3.435,0.25) 7(-3.435,-0.25) 8(-3.435,-0.75) 9(-3.435,-1.25) 10(-3.435,-1.75) 11(-3.435,-2.251) 12(-3.435,-2.751) 25(3.435,-2.751) 26(3.435,-2.251) 27(3.435,-1.75) 28(3.435,-1.25) 29(3.435,-0.75) 30(3.435,-0.25) 31(3.435,0.25) 32(3.435,0.75) 33(3.435,1.25) 34(3.435,1.75) 35(3.435,2.251) 36(3.435,2.751)
  rect 0.26x0.86 smd paste-0.13 mask+0: 13(-2.751,-3.435) 14(-2.251,-3.435) 15(-1.75,-3.435) 16(-1.25,-3.435) 17(-0.75,-3.435) 18(-0.25,-3.435) 19(0.25,-3.435) 20(0.75,-3.435) 21(1.25,-3.435) 22(1.75,-3.435) 23(2.251,-3.435) 24(2.751,-3.435) 37(2.751,3.435) 38(2.251,3.435) 39(1.75,3.435) 40(1.25,3.435) 41(0.75,3.435) 42(0.25,3.435) 43(-0.25,3.435) 44(-0.75,3.435) 45(-1.25,3.435) 46(-1.75,3.435) 47(-2.251,3.435) 48(-2.751,3.435)
  rect 5.3x5.3 smd paste-2.65 mask+0: 49(0,0)
Top Overlay:
  region: -4.119,-1.56 -4.373,-1.56 -4.373,-1.941 -4.119,-1.941
  region: 0.941,-4.119 0.56,-4.119 0.56,-4.373 0.941,-4.373
  region: 4.119,-0.06 4.373,-0.06 4.373,-0.441 4.119,-0.441
  region: 1.441,4.119 1.06,4.119 1.06,4.373 1.441,4.373
  lines w0.152: -3.881,-3.213 -3.881,-3.881 -3.213,-3.881 ; -3.881,3.213 -3.881,3.881 -3.213,3.881 ; 3.213,-3.881 3.881,-3.881 3.881,-3.213 ; 3.213,3.881 3.881,3.881 3.881,3.213
  text "*" at -4.817,2.747 h1.27
Top Paste:
  drawing of 64 lines, arcs and shapes, not listed
Top Solder:
  drawing of 48 lines, arcs and shapes, not listed
Mechanical 13:
  lines w0.025: -3.5,2.23 -2.23,3.5 ; -3.5,-3.5 3.5,-3.5 3.5,3.5 -3.5,3.5 -3.5,-3.5
  text "*" at -3.069,2.366 h1.27
Mechanical 15:
  region: -3.135,-3.754 -3.754,-3.754 -3.754,-3.135 -4.119,-3.135 -4.119,3.135 -3.754,3.135 -3.754,3.754 -3.135,3.754 -3.135,4.119 3.135,4.119 3.135,3.754 3.754,3.754 3.754,3.135 4.119,3.135 4.119,-3.135 3.754,-3.135 3.754,-3.754 3.135,-3.754 3.135,-4.119 -3.135,-4.119
  lines w0.152: -4.119,-3.135 -3.754,-3.135 -3.754,-3.754 -3.135,-3.754 -3.135,-4.119 3.135,-4.119 3.135,-3.754 3.754,-3.754 3.754,-3.135 4.119,-3.135 4.119,3.135 3.754,3.135 3.754,3.754 3.135,3.754 3.135,4.119 -3.135,4.119 -3.135,3.754 -3.754,3.754 -3.754,3.135 -4.119,3.135 -4.119,-3.135
3D body "QFN48_7X7_5p3epad.step": height 0.9, standoff 0, extent -3.551,-3.551 3.551,3.551

## QFN48B_7X7 [mm]
pads (49):
  rect 0.86x0.26 smd paste+0 mask+0.064: 1(-3.435,2.75) 2(-3.435,2.25) 3(-3.435,1.75) 4(-3.435,1.25) 5(-3.435,0.75) 6(-3.435,0.25) 7(-3.435,-0.25) 8(-3.435,-0.75) 9(-3.435,-1.25) 10(-3.435,-1.75) 11(-3.435,-2.25) 12(-3.435,-2.75) 25(3.435,-2.75) 26(3.435,-2.25) 27(3.435,-1.75) 28(3.435,-1.25) 29(3.435,-0.75) 30(3.435,-0.25) 31(3.435,0.25) 32(3.435,0.75) 33(3.435,1.25) 34(3.435,1.75) 35(3.435,2.25) 36(3.435,2.75)
  rect 0.26x0.86 smd paste+0 mask+0.064: 13(-2.75,-3.435) 14(-2.25,-3.435) 15(-1.75,-3.435) 16(-1.25,-3.435) 17(-0.75,-3.435) 18(-0.25,-3.435) 19(0.25,-3.435) 20(0.75,-3.435) 21(1.25,-3.435) 22(1.75,-3.435) 23(2.25,-3.435) 24(2.75,-3.435) 37(2.75,3.435) 38(2.25,3.435) 39(1.75,3.435) 40(1.25,3.435) 41(0.75,3.435) 42(0.25,3.435) 43(-0.25,3.435) 44(-0.75,3.435) 45(-1.25,3.435) 46(-1.75,3.435) 47(-2.25,3.435) 48(-2.75,3.435)
  rect 4.7x4.7 smd paste-2.35 mask+0: 49(0,0)
Top Overlay:
  circle w0.152: c-4.369,2.75 r0.076
  lines w0.152: -3.627,-3.213 -3.627,-3.627 -3.213,-3.627 ; -3.627,3.213 -3.627,3.627 -3.213,3.627 ; 3.213,-3.627 3.627,-3.627 3.627,-3.213 ; 3.213,3.627 3.627,3.627 3.627,3.213
Top Paste:
  region: 2.25,-0.883 0.883,-0.883 0.883,-2.25 2.25,-2.25
  region: 2.25,0.683 0.883,0.683 0.883,-0.683 2.25,-0.683
  region: 2.25,2.25 0.883,2.25 0.883,0.883 2.25,0.883
  region: 0.683,-0.883 -0.683,-0.883 -0.683,-2.25 0.683,-2.25
  region: 0.683,0.683 -0.683,0.683 -0.683,-0.683 0.683,-0.683
  region: 0.683,2.25 -0.683,2.25 -0.683,0.883 0.683,0.883
  region: -0.883,-0.883 -2.25,-0.883 -2.25,-2.25 -0.883,-2.25
  region: -0.883,0.683 -2.25,0.683 -2.25,-0.683 -0.883,-0.683
  region: -0.883,2.25 -2.25,2.25 -2.25,0.883 -0.883,0.883
Mechanical 13:
  circle w0: c-3.259,2.75 r0.076
  lines w0.025: -3.5,2.23 -2.23,3.5 ; -3.5,-3.5 -3.5,3.5 3.5,3.5 3.5,-3.5 -3.5,-3.5
Mechanical 15:
  region: -3.258,-3.754 -3.754,-3.754 -3.754,-3.258 -4.119,-3.258 -4.119,3.258 -3.754,3.258 -3.754,3.754 -3.258,3.754 -3.258,4.119 3.258,4.119 3.258,3.754 3.754,3.754 3.754,3.258 4.119,3.258 4.119,-3.258 3.754,-3.258 3.754,-3.754 3.258,-3.754 3.258,-4.119 -3.258,-4.119
  lines w0.152: -4.119,-3.258 -4.119,3.258 -3.754,3.258 -3.754,3.754 -3.258,3.754 -3.258,4.119 3.258,4.119 3.258,3.754 3.754,3.754 3.754,3.258 4.119,3.258 4.119,-3.258 3.754,-3.258 3.754,-3.754 3.258,-3.754 3.258,-4.119 -3.258,-4.119 -3.258,-3.754 -3.754,-3.754 -3.754,-3.258 -4.119,-3.258
3D body "QFN48B_7X7.step": height 0.9, standoff 0, extent -3.5,-3.5 3.5,3.5

## QFN68_8X8 [mm]
pads (69):
  rect 0.86x0.22 smd paste-0.11 mask+0: 1(-3.935,3.2) 2(-3.935,2.8) 3(-3.935,2.4) 4(-3.935,2) 5(-3.935,1.6) 6(-3.935,1.2) 7(-3.935,0.8) 8(-3.935,0.4) 9(-3.935,0) 10(-3.935,-0.4) 11(-3.935,-0.8) 12(-3.935,-1.2) 13(-3.935,-1.6) 14(-3.935,-2) 15(-3.935,-2.4) 16(-3.935,-2.8) 17(-3.935,-3.2) 35(3.935,-3.2) 36(3.935,-2.8) 37(3.935,-2.4) 38(3.935,-2) 39(3.935,-1.6) 40(3.935,-1.2) 41(3.935,-0.8) 42(3.935,-0.4) 43(3.935,0) 44(3.935,0.4) 45(3.935,0.8) 46(3.935,1.2) 47(3.935,1.6) 48(3.935,2) 49(3.935,2.4) 50(3.935,2.8) 51(3.935,3.2)
  rect 0.22x0.86 smd paste-0.11 mask+0: 18(-3.2,-3.935) 19(-2.8,-3.935) 20(-2.4,-3.935) 21(-2,-3.935) 22(-1.6,-3.935) 23(-1.2,-3.935) 24(-0.8,-3.935) 25(-0.4,-3.935) 26(0,-3.935) 27(0.4,-3.935) 28(0.8,-3.935) 29(1.2,-3.935) 30(1.6,-3.935) 31(2,-3.935) 32(2.4,-3.935) 33(2.8,-3.935) 34(3.2,-3.935) 52(3.2,3.935) 53(2.8,3.935) 54(2.4,3.935) 55(2,3.935) 56(1.6,3.935) 57(1.2,3.935) 58(0.8,3.935) 59(0.4,3.935) 60(0,3.935) 61(-0.4,3.935) 62(-0.8,3.935) 63(-1.2,3.935) 64(-1.6,3.935) 65(-2,3.935) 66(-2.4,3.935) 67(-2.8,3.935) 68(-3.2,3.935)
  rect 6.35x6.35 smd paste-3.175 mask+0: 69(0,0)
Top Overlay:
  region: 0.191,4.619 -0.191,4.619 -0.191,4.873 0.191,4.873
  region: 4.619,2.99 4.873,2.99 4.873,2.609 4.619,2.609
  region: 4.619,-1.01 4.873,-1.01 4.873,-1.391 4.619,-1.391
  region: 1.79,-4.619 1.409,-4.619 1.409,-4.873 1.79,-4.873
  region: -2.21,-4.619 -2.591,-4.619 -2.591,-4.873 -2.21,-4.873
  region: -4.619,-0.209 -4.873,-0.209 -4.873,-0.59 -4.619,-0.59
  lines w0.152: -4.381,-3.642 -4.381,-4.381 -3.642,-4.381 ; -4.381,3.642 -4.381,4.381 -3.642,4.381 ; 3.642,-4.381 4.381,-4.381 4.381,-3.642 ; 3.642,4.381 4.381,4.381 4.381,3.642
  text "*" at -5.318,3.146 h1.27
Top Paste:
  drawing of 93 lines, arcs and shapes, not listed
Top Solder:
  drawing of 68 lines, arcs and shapes, not listed
Mechanical 13:
  lines w0.025: -4,2.73 -2.73,4 ; -4,-4 -4,4 4,4 4,-4 -4,-4
  text "*" at -3.568,2.765 h1.27
Mechanical 15:
  region: -3.564,-4.254 -4.254,-4.254 -4.254,-3.564 -4.619,-3.564 -4.619,3.564 -4.254,3.564 -4.254,4.254 -3.564,4.254 -3.564,4.619 3.564,4.619 3.564,4.254 4.254,4.254 4.254,3.564 4.619,3.564 4.619,-3.564 4.254,-3.564 4.254,-4.254 3.564,-4.254 3.564,-4.619 -3.564,-4.619
  lines w0.152: -4.619,-3.564 -4.619,3.564 -4.254,3.564 -4.254,4.254 -3.564,4.254 -3.564,4.619 3.564,4.619 3.564,4.254 4.254,4.254 4.254,3.564 4.619,3.564 4.619,-3.564 4.254,-3.564 4.254,-4.254 3.564,-4.254 3.564,-4.619 -3.564,-4.619 -3.564,-4.254 -4.254,-4.254 -4.254,-3.564 -4.619,-3.564
3D body "QFN68_8X8.step": height 0.9, standoff 0, extent -4.051,-4.051 4.051,4.051

## QFN68_8X8_SIL [mm]
pads (69):
  rect 0.85x0.2 smd paste+0 mask+0: 1(-3.935,3.2) 2(-3.935,2.8) 3(-3.935,2.4) 4(-3.935,2) 5(-3.935,1.6) 6(-3.935,1.2) 7(-3.935,0.8) 8(-3.935,0.4) 9(-3.935,0) 10(-3.935,-0.4) 11(-3.935,-0.8) 12(-3.935,-1.2) 13(-3.935,-1.6) 14(-3.935,-2) 15(-3.935,-2.4) 16(-3.935,-2.8) 17(-3.935,-3.2) 35(3.935,-3.2) 36(3.935,-2.8) 37(3.935,-2.4) 38(3.935,-2) 39(3.935,-1.6) 40(3.935,-1.2) 41(3.935,-0.8) 42(3.935,-0.4) 43(3.935,0) 44(3.935,0.4) 45(3.935,0.8) 46(3.935,1.2) 47(3.935,1.6) 48(3.935,2) 49(3.935,2.4) 50(3.935,2.8) 51(3.935,3.2)
  rect 0.2x0.85 smd paste+0 mask+0: 18(-3.2,-3.935) 19(-2.8,-3.935) 20(-2.4,-3.935) 21(-2,-3.935) 22(-1.6,-3.935) 23(-1.2,-3.935) 24(-0.8,-3.935) 25(-0.4,-3.935) 26(0,-3.935) 27(0.4,-3.935) 28(0.8,-3.935) 29(1.2,-3.935) 30(1.6,-3.935) 31(2,-3.935) 32(2.4,-3.935) 33(2.8,-3.935) 34(3.2,-3.935) 52(3.2,3.935) 53(2.8,3.935) 54(2.4,3.935) 55(2,3.935) 56(1.6,3.935) 57(1.2,3.935) 58(0.8,3.935) 59(0.4,3.935) 60(0,3.935) 61(-0.4,3.935) 62(-0.8,3.935) 63(-1.2,3.935) 64(-1.6,3.935) 65(-2,3.935) 66(-2.4,3.935) 67(-2.8,3.935) 68(-3.2,3.935)
  rect 5.6x5.6 smd paste+0 mask+0: 69(0,0)
Top Overlay:
  region: -4.614,-0.209 -4.868,-0.209 -4.868,-0.59 -4.614,-0.59
  region: -2.21,-4.614 -2.591,-4.614 -2.591,-4.868 -2.21,-4.868
  region: 1.79,-4.614 1.409,-4.614 1.409,-4.868 1.79,-4.868
  region: 4.614,-1.01 4.868,-1.01 4.868,-1.391 4.614,-1.391
  region: 4.614,2.99 4.868,2.99 4.868,2.609 4.614,2.609
  region: 0.191,4.614 -0.191,4.614 -0.191,4.868 0.191,4.868
  lines w0.152: -4.381,-3.632 -4.381,-4.381 -3.632,-4.381 ; -4.381,3.632 -4.381,4.381 -3.632,4.381 ; 3.632,-4.381 4.381,-4.381 4.381,-3.632 ; 3.632,4.381 4.381,4.381 4.381,3.632
  text "*" at -5.312,3.146 h1.27
Mechanical 13:
  lines w0.025: -4,2.73 -2.73,4 ; -4,-4 4,-4 4,4 -4,4 -4,-4
  text "*" at -3.574,2.765 h1.27
Mechanical 15:
  region: -3.554,-4.254 -4.254,-4.254 -4.254,-3.554 -4.614,-3.554 -4.614,3.554 -4.254,3.554 -4.254,4.254 -3.554,4.254 -3.554,4.614 3.554,4.614 3.554,4.254 4.254,4.254 4.254,3.554 4.614,3.554 4.614,-3.554 4.254,-3.554 4.254,-4.254 3.554,-4.254 3.554,-4.614 -3.554,-4.614
  lines w0.152: -4.614,-3.554 -4.254,-3.554 -4.254,-4.254 -3.554,-4.254 -3.554,-4.614 3.554,-4.614 3.554,-4.254 4.254,-4.254 4.254,-3.554 4.614,-3.554 4.614,3.554 4.254,3.554 4.254,4.254 3.554,4.254 3.554,4.614 -3.554,4.614 -3.554,4.254 -4.254,4.254 -4.254,3.554 -4.614,3.554 -4.614,-3.554
3D body "QFN68_8X8_SIL.step": height 0.9, standoff 0, extent -4.051,-4.051 4.051,4.051

## QFN_32_SIL [mm]
pads (33):
  rect 0.76x0.22 smd paste+0 mask+0: 1(-1.985,1.4) 2(-1.985,1) 3(-1.985,0.6) 4(-1.985,0.2) 5(-1.985,-0.2) 6(-1.985,-0.6) 7(-1.985,-1) 8(-1.985,-1.4) 17(1.985,-1.4) 18(1.985,-1) 19(1.985,-0.6) 20(1.985,-0.2) 21(1.985,0.2) 22(1.985,0.6) 23(1.985,1) 24(1.985,1.4)
  rect 0.22x0.76 smd paste+0 mask+0: 9(-1.4,-1.985) 10(-1,-1.985) 11(-0.6,-1.985) 12(-0.2,-1.985) 13(0.2,-1.985) 14(0.6,-1.985) 15(1,-1.985) 16(1.4,-1.985) 25(1.4,1.985) 26(1,1.985) 27(0.6,1.985) 28(0.2,1.985) 29(-0.2,1.985) 30(-0.6,1.985) 31(-1,1.985) 32(-1.4,1.985)
  rect 2.8x2.8 smd paste-1.387 mask+0: 33(0,0)
Top Overlay:
  lines w0.152: -2.127,-1.843 -2.127,-2.127 -1.843,-2.127 ; -2.127,1.843 -2.127,2.127 -1.843,2.127 ; 1.843,-2.127 2.127,-2.127 2.127,-1.843 ; 1.843,2.127 2.127,2.127 2.127,1.843
  text "*" at -3.317,0.765 h1.27
Top Paste:
  region: -0.1,1.3 -1.3,1.3 -1.3,0.1 -0.1,0.1
  region: -0.1,-0.1 -1.3,-0.1 -1.3,-1.3 -0.1,-1.3
  region: 1.3,1.3 0.1,1.3 0.1,0.1 1.3,0.1
  region: 1.3,-0.1 0.1,-0.1 0.1,-1.3 1.3,-1.3
Mechanical 13:
  lines w0.025: -2,0.73 -0.73,2 ; -2,-2 2,-2 2,2 -2,2 -2,-2
  text "*" at -1.288,0.765 h1.27
Mechanical 15:
  region: -1.764,-2.254 -2.254,-2.254 -2.254,-1.764 -2.619,-1.764 -2.619,1.764 -2.254,1.764 -2.254,2.254 -1.764,2.254 -1.764,2.619 1.764,2.619 1.764,2.254 2.254,2.254 2.254,1.764 2.619,1.764 2.619,-1.764 2.254,-1.764 2.254,-2.254 1.764,-2.254 1.764,-2.619 -1.764,-2.619
  lines w0.152: -2.619,-1.764 -2.254,-1.764 -2.254,-2.254 -1.764,-2.254 -1.764,-2.619 1.764,-2.619 1.764,-2.254 2.254,-2.254 2.254,-1.764 2.619,-1.764 2.619,1.764 2.254,1.764 2.254,2.254 1.764,2.254 1.764,2.619 -1.764,2.619 -1.764,2.254 -2.254,2.254 -2.254,1.764 -2.619,1.764 -2.619,-1.764
3D body "QFN_32_SIL.step": height 0.83, standoff 0, extent -2,-2 2,2

## QFN_40_SIL [mm]
pads (41):
  rect 0.74x0.22 smd paste+0 mask+0: 1(-2.495,1.8) 2(-2.495,1.4) 3(-2.495,1) 4(-2.495,0.6) 5(-2.495,0.2) 6(-2.495,-0.2) 7(-2.495,-0.6) 8(-2.495,-1) 9(-2.495,-1.4) 10(-2.495,-1.8) 21(2.495,-1.8) 22(2.495,-1.4) 23(2.495,-1) 24(2.495,-0.6) 25(2.495,-0.2) 26(2.495,0.2) 27(2.495,0.6) 28(2.495,1) 29(2.495,1.4) 30(2.495,1.8)
  rect 0.22x0.74 smd paste+0 mask+0: 11(-1.8,-2.495) 12(-1.4,-2.495) 13(-1,-2.495) 14(-0.6,-2.495) 15(-0.2,-2.495) 16(0.2,-2.495) 17(0.6,-2.495) 18(1,-2.495) 19(1.4,-2.495) 20(1.8,-2.495) 31(1.8,2.495) 32(1.4,2.495) 33(1,2.495) 34(0.6,2.495) 35(0.2,2.495) 36(-0.2,2.495) 37(-0.6,2.495) 38(-1,2.495) 39(-1.4,2.495) 40(-1.8,2.495)
  rect 3.85x3.85 smd paste-1.912 mask+0: 41(0,0)
Top Overlay:
  lines w0.152: -2.627,-2.243 -2.627,-2.627 -2.243,-2.627 ; -2.627,2.243 -2.627,2.627 -2.243,2.627 ; 2.243,-2.627 2.627,-2.627 2.627,-2.243 ; 2.243,2.627 2.627,2.627 2.627,2.243
  text "*" at -3.818,1.165 h1.27
Top Paste:
  region: -0.742,1.825 -1.825,1.825 -1.825,0.742 -0.742,0.742
  region: -0.742,0.542 -1.825,0.542 -1.825,-0.542 -0.742,-0.542
  region: -0.742,-0.742 -1.825,-0.742 -1.825,-1.825 -0.742,-1.825
  region: 0.542,1.825 -0.542,1.825 -0.542,0.742 0.542,0.742
  region: 0.542,0.542 -0.542,0.542 -0.542,-0.542 0.542,-0.542
  region: 0.542,-0.742 -0.542,-0.742 -0.542,-1.825 0.542,-1.825
  region: 1.825,1.825 0.742,1.825 0.742,0.742 1.825,0.742
  region: 1.825,0.542 0.742,0.542 0.742,-0.542 1.825,-0.542
  region: 1.825,-0.742 0.742,-0.742 0.742,-1.825 1.825,-1.825
Mechanical 13:
  lines w0.025: -2.5,1.23 -1.23,2.5 ; -2.5,-2.5 2.5,-2.5 2.5,2.5 -2.5,2.5 -2.5,-2.5
  text "*" at -1.807,1.165 h1.27
Mechanical 15:
  region: -2.164,-2.754 -2.754,-2.754 -2.754,-2.164 -3.119,-2.164 -3.119,2.164 -2.754,2.164 -2.754,2.754 -2.164,2.754 -2.164,3.119 2.164,3.119 2.164,2.754 2.754,2.754 2.754,2.164 3.119,2.164 3.119,-2.164 2.754,-2.164 2.754,-2.754 2.164,-2.754 2.164,-3.119 -2.164,-3.119
  lines w0.152: -3.119,-2.164 -2.754,-2.164 -2.754,-2.754 -2.164,-2.754 -2.164,-3.119 2.164,-3.119 2.164,-2.754 2.754,-2.754 2.754,-2.164 3.119,-2.164 3.119,2.164 2.754,2.164 2.754,2.754 2.164,2.754 2.164,3.119 -2.164,3.119 -2.164,2.754 -2.754,2.754 -2.754,2.164 -3.119,2.164 -3.119,-2.164
3D body "QFN_40_SIL.step": height 0.83, standoff 0, extent -2.5,-2.5 2.5,2.5

## QFN_48_SIL [mm]
pads (49):
  rect 0.86x0.22 smd paste+0 mask+0: 1(-2.935,2.2) 2(-2.935,1.8) 3(-2.935,1.4) 4(-2.935,1) 5(-2.935,0.6) 6(-2.935,0.2) 7(-2.935,-0.2) 8(-2.935,-0.6) 9(-2.935,-1) 10(-2.935,-1.4) 11(-2.935,-1.8) 12(-2.935,-2.2) 25(2.935,-2.2) 26(2.935,-1.8) 27(2.935,-1.4) 28(2.935,-1) 29(2.935,-0.6) 30(2.935,-0.2) 31(2.935,0.2) 32(2.935,0.6) 33(2.935,1) 34(2.935,1.4) 35(2.935,1.8) 36(2.935,2.2)
  rect 0.22x0.86 smd paste+0 mask+0: 13(-2.2,-2.935) 14(-1.8,-2.935) 15(-1.4,-2.935) 16(-1,-2.935) 17(-0.6,-2.935) 18(-0.2,-2.935) 19(0.2,-2.935) 20(0.6,-2.935) 21(1,-2.935) 22(1.4,-2.935) 23(1.8,-2.935) 24(2.2,-2.935) 37(2.2,2.935) 38(1.8,2.935) 39(1.4,2.935) 40(1,2.935) 41(0.6,2.935) 42(0.2,2.935) 43(-0.2,2.935) 44(-0.6,2.935) 45(-1,2.935) 46(-1.4,2.935) 47(-1.8,2.935) 48(-2.2,2.935)
  rect 4.45x4.45 smd paste-2.212 mask+0: 49(0,0)
Top Overlay:
  lines w0.152: -3.127,-2.643 -3.127,-3.127 -2.643,-3.127 ; -3.127,2.643 -3.127,3.127 -2.643,3.127 ; 2.643,-3.127 3.127,-3.127 3.127,-2.643 ; 2.643,3.127 3.127,3.127 3.127,2.643
  text "*" at -4.317,1.565 h1.27
Top Paste:
  region: 2.125,-0.842 0.842,-0.842 0.842,-2.125 2.125,-2.125
  region: 2.125,0.642 0.842,0.642 0.842,-0.642 2.125,-0.642
  region: 2.125,2.125 0.842,2.125 0.842,0.842 2.125,0.842
  region: 0.642,-0.842 -0.642,-0.842 -0.642,-2.125 0.642,-2.125
  region: 0.642,0.642 -0.642,0.642 -0.642,-0.642 0.642,-0.642
  region: 0.642,2.125 -0.642,2.125 -0.642,0.842 0.642,0.842
  region: -0.842,-0.842 -2.125,-0.842 -2.125,-2.125 -0.842,-2.125
  region: -0.842,0.642 -2.125,0.642 -2.125,-0.642 -0.842,-0.642
  region: -0.842,2.125 -2.125,2.125 -2.125,0.842 -0.842,0.842
Mechanical 13:
  lines w0.025: -3,1.73 -1.73,3 ; -3,-3 -3,3 3,3 3,-3 -3,-3
  text "*" at -2.188,1.565 h1.27
Mechanical 15:
  region: -2.564,-3.254 -3.254,-3.254 -3.254,-2.564 -3.619,-2.564 -3.619,2.564 -3.254,2.564 -3.254,3.254 -2.564,3.254 -2.564,3.619 2.564,3.619 2.564,3.254 3.254,3.254 3.254,2.564 3.619,2.564 3.619,-2.564 3.254,-2.564 3.254,-3.254 2.564,-3.254 2.564,-3.619 -2.564,-3.619
  lines w0.152: -3.619,-2.564 -3.619,2.564 -3.254,2.564 -3.254,3.254 -2.564,3.254 -2.564,3.619 2.564,3.619 2.564,3.254 3.254,3.254 3.254,2.564 3.619,2.564 3.619,-2.564 3.254,-2.564 3.254,-3.254 2.564,-3.254 2.564,-3.619 -2.564,-3.619 -2.564,-3.254 -3.254,-3.254 -3.254,-2.564 -3.619,-2.564
3D body "QFN_48_SIL.step": height 0.83, standoff 0, extent -3,-3 3,3